# Altium footprint library FootPrintLib_10.PcbLib: 270 footprints (part 6 of 17)
Each footprint in its own frame and in the unit in brackets; x right, y up, seen from the top. Pads: shape width x height; smd on the part's side, far side on the other; paste and mask are expansions set on the pad; w line width, h text height; cw(c..) or ccw(c..) is an arc to the next point about the centre after c.
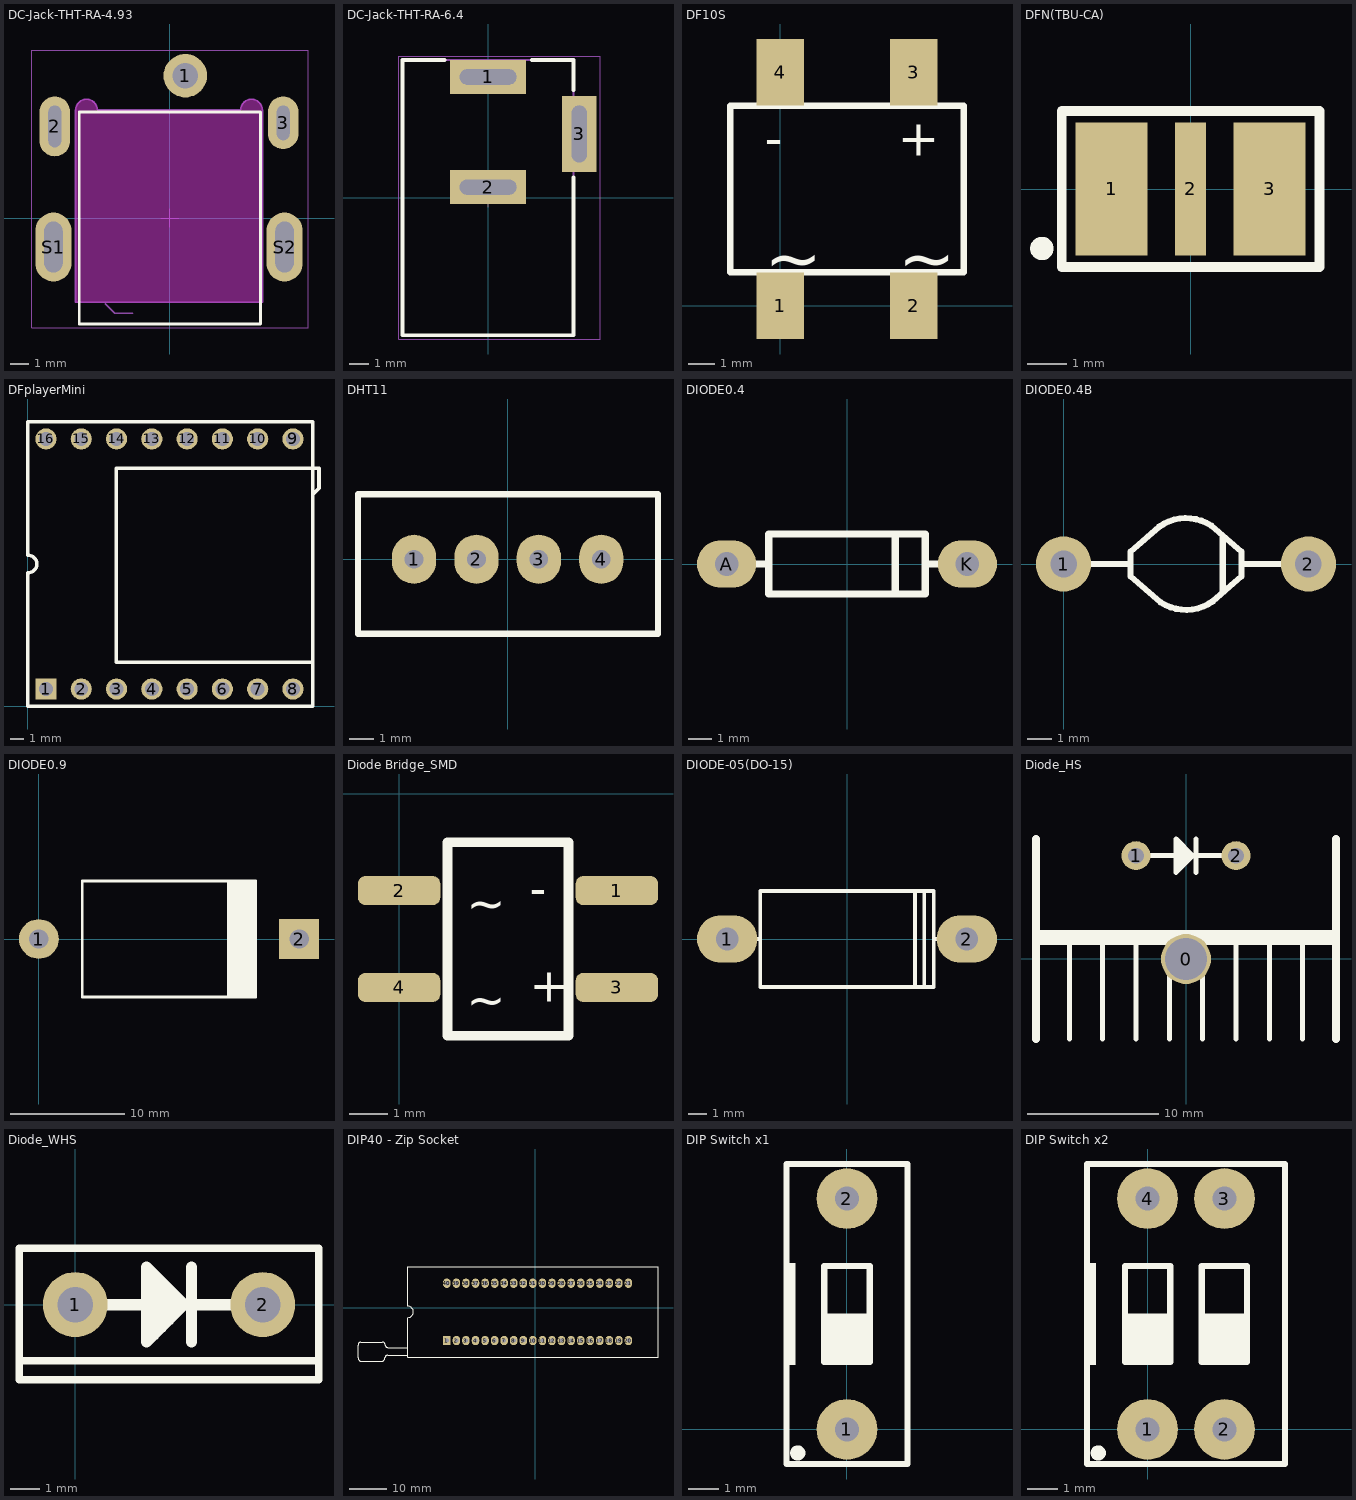
[diagram p5: the footprints below, top view; thin cyan lines are the x and y axes]

## DC-Jack-THT-RA-4.93 [mm] "DC Power Jack Right Angled Shielded THT ?4.93"
height 9.1
pads (5):
  round 2.4 hole 1.4: 1(0.85,7.85)
  oval 1.7x3.3 hole 0.7 slot 2.3 at 90 deg: 2(-6.35,5.05)
  oval 1.7x2.9 hole 0.7 slot 1.9 at 90 deg: 3(6.25,5.25)
  oval 2x3.8 hole 1 slot 2.8 at 90 deg: S1(-6.425,-1.6) S2(6.325,-1.6)
Top Overlay:
  lines w0.15: -5,-5.85 5,-5.85 5,5.85 -5,5.85 -5,-5.85
Keep-Out Layer:
  board cut-out: -5.2,-4.65 5.1,-4.65 5.1,5.95 5.1,6.069 5.009,6.29 4.84,6.459 4.619,6.55 4.381,6.55 4.16,6.459 3.991,6.29 3.9,6.069 3.9,5.95 -4,5.95 -4,6.069 -4.091,6.29 -4.26,6.459 -4.481,6.55 -4.719,6.55 -4.94,6.459 -5.109,6.29 -5.2,6.069 -5.2,5.95
Mechanical 2:
  lines w0.1: -3.55,-4.75 -3.05,-5.25 -2.05,-5.25
  text "PCB Edge" at -1.82,-5.57 h1
  text "Board Cutout Area" at -3.55,-0.25 h1
Mechanical 8:
  lines w0.1: -5.2,-4.65 -5.2,5.95 cw(c-4.6,5.95) -4,5.95 3.9,5.95 cw(c4.5,5.95) 5.1,5.95 5.1,-4.65 -5.2,-4.65
Mechanical 13:
  lines w0.1: -5,-5.85 -5,5.85 5,5.85 5,-5.85 -5,-5.85
Mechanical 15:
  lines w0.05: -0.5,0 0.5,0 ; 0,-0.5 0,0.5 ; -7.625,-6.05 7.625,-6.05 7.625,9.25 -7.625,9.25 -7.625,-6.05
3D body "694105309102.stp": height 5.45, standoff -3.65, extent -6.61,-5.85 6.51,8.35

## DC-Jack-THT-RA-6.4 [mm] "DC Power Jack Right Angled(6.4)"
height 10.7
pads (3):
  rect 4x1.8 hole 0.8 slot 3 at 0 deg: 1(0,6.35) 2(0,0.55)
  rect 1.8x4 hole 0.8 slot 3 at 90 deg: 3(4.8,3.35)
Top Overlay:
  lines w0.2: -2.3,7.25 -4.5,7.25 -4.5,-7.25 4.5,-7.25 4.5,1.05 ; 2.3,7.25 4.5,7.25 4.5,5.65
Mechanical 13:
  lines w0.1: -4.5,-7.25 4.5,-7.25 4.5,7.25 -4.5,7.25 -4.5,-7.25
Mechanical 15:
  lines w0.05: -0.5,0 0.5,0 ; 0,-0.5 0,0.5 ; -4.7,-7.45 5.9,-7.45 5.9,7.45 -4.7,7.45 -4.7,-7.45
3D body "694106301002.stp": height 10.75, standoff -3.75, extent -4.5,-7.25 5,7.25

## DF10S [mm]
pads (4):
  rect 1.8x2.54 smd: 1(0,0) 2(5.08,0) 3(5.08,8.89) 4(0,8.89)
Top Overlay:
  lines w0.254: -1.905,1.27 -1.905,7.62 6.985,7.62 6.985,1.27 -1.905,1.27
  text "+" at 4.481,5.715 h1.4
  text "-" at -0.599,5.715 h1.4
  text "~" at 4.49,0.889 h1.91
  text "~" at -0.59,0.889 h1.91

## DFN(TBU-CA) [mm] "TBU-CA Series - TBU® High-Speed Protectors"
height 1
pads (3):
  rect 1.85x3.4 smd: 1(-2.025,0) 3(2.025,0)
  rect 0.8x3.4 smd: 2(0,0)
Top Overlay:
  circle w0.3: c-3.81,-1.524 r0.15
  lines w0.254: -3.286,-2 -3.3,-2 ; -3.3,-2 3.3,-2 3.3,2 -3.3,2 -3.3,-2
3D body "User Library-Part+Studio+1.STEP": height 1, standoff -0.05, extent -3.25,-2 3.25,2

## DFplayerMini [mm] "Mini MP3 And WMV Player"
height 10
pads (16):
  rect 1.524x1.524 hole 1: 1(1.3,1.25)
  round 1.524 hole 1: 2(3.84,1.25) 3(6.38,1.25) 4(8.92,1.25) 5(11.46,1.25) 6(14,1.25) 7(16.54,1.25) 8(19.08,1.25) 9(19.08,19.25) 10(16.54,19.25) 11(14,19.25) 12(11.46,19.25) 13(8.92,19.25) 14(6.38,19.25) 15(3.84,19.25) 16(1.3,19.25)
Top Overlay:
  lines w0.254: 20.5,3.175 6.35,3.175 6.35,17.145 20.5,17.145 20.955,17.145 20.955,15.695 20.5,15.24 ; 0,0 20.5,0 20.5,20.5 0,20.5 0,10.891 cw(c0,10.25) 0,9.609 0,0

## DHT11 [mm]
pads (4):
  oval 1.8x2 hole 0.762: 1(-3.81,0) 2(-1.27,0) 3(1.27,0) 4(3.81,0)
Top Overlay:
  lines w0.254: -6.09,-3.03 -6.09,2.64 6.12,2.64 6.12,-3.03 -6.09,-3.03
3D body "DHT_11.SLDPRT": height 15.5, standoff -8, extent -5.98,-2.98 6.02,2.52

## DIODE0.4 [mm]
pads (2):
  oval 2.5x2 hole 1: A(-5.08,0) K(5.08,0)
Top Overlay:
  lines w0.305: -4.064,0 -3.302,0 ; 2.032,-1.27 2.032,1.27 ; 3.302,0 4.064,0 ; -3.302,-1.27 -3.302,1.27 3.302,1.27 3.302,-1.27 -3.302,-1.27
3D body "User Library-DO-41-1.step": height 3.24, standoff -2.09, extent -5.512,-1.37 5.512,1.37

## DIODE0.4B [mil]
pads (2):
  round 90 hole 43.31: 1(0,0) 2(400,0)
Top Overlay:
  lines w10: 40,0 109.45,0 ; 260,-45 260,45 ; 290.55,0 360,0 ; 109.45,-20 158.4,-62.4 ccw(c200,0) 243.59,-61.03 290.55,-20 290.55,20 241.6,62.4 ccw(c200,0) 156.41,61.03 109.45,20 109.45,-20

## DIODE0.9 [mm]
pads (2):
  round 3.5 hole 1.7: 1(0,0)
  rect 3.5x3.5 hole 1.7: 2(22.86,0)
Top Overlay:
  rectangle: 16.51,-5.08 19.05,5.08
  lines w0.254: 3.81,-5.08 3.81,5.08 19.05,5.08 19.05,-5.08 3.81,-5.08

## Diode Bridge_SMD [mil]
pads (4):
  rrect50% 85x30 smd: 1(225,-100) 2(0,-100) 3(225,-200) 4(0,-200)
Top Overlay:
  lines w10: 50,-250 50,-50 175,-50 175,-250 50,-250
  text "~" at 70,-230 h35
  text "+" at 135,-215 h35
  text "~" at 70,-130 h35
  text "-" at 135,-115 h35

## DIODE-05(DO-15) [mm]
height 7.5
pads (2):
  oval 3.2x2.5 hole 1.2: 1(-6.35,0) 2(6.35,0)
Top Overlay:
  lines w0.2: -6,0 -4.6,0 ; 3.6,-2.54 3.6,2.54 ; 4.1,-2.54 4.1,2.54 ; 4.6,0 6,0 ; -4.6,-2.54 4.6,-2.54 4.6,2.54 -4.6,2.54 -4.6,-2.54
3D body "User Library-DO-204AR-1.STEP": height 6.22, standoff -2, extent -9.525,-3.112 9.525,3.113

## Diode_HS [mm]
pads (3):
  round 3.81 hole 3.2: 0(0,-0.024)
  round 2.2 hole 1.2: 1(-3.81,7.85) 2(3.81,7.85)
Top Overlay:
  lines w0.381: -11.43,1.246 11.43,1.246 11.43,1.754 -11.43,1.754 -11.43,1.5 11.43,1.5 ; -11.43,2.008 11.43,2.008 ; -8.89,-6.12 -8.89,1.5 ; -6.35,-6.12 -6.35,1.5 ; -3.81,-6.12 -3.81,1.5 ; -3.81,7.85 3.81,7.85 ; -1.27,-6.12 -1.27,1.5 ; -0.508,6.834 -0.508,8.866 ; -0.254,7.088 -0.254,8.612 ; 0,7.342 0,8.358 ; 0.762,6.58 0.762,9.12 ; 1.27,-6.12 1.27,1.5 ; 3.81,-6.12 3.81,1.5 ; 6.35,-6.12 6.35,1.5 ; 8.89,-6.12 8.89,1.5 ; -0.762,6.58 -0.762,9.12 0.508,7.85 -0.762,6.58
  lines w0.635: -11.43,-6.12 -11.43,9.12 ; 11.43,-6.12 11.43,9.12

## Diode_WHS [mm]
pads (2):
  round 2.2 hole 1.2: 1(0,0) 2(6.35,0)
Top Overlay:
  lines w0.254: -1.905,-1.905 8.255,-1.905 ; -1.905,-2.54 8.255,-2.54 8.255,1.905 -1.905,1.905 -1.905,-2.54
  lines w0.381: 0,0 6.35,0 ; 2.667,-1.016 2.667,1.016 ; 2.921,-0.762 2.921,0.762 ; 3.175,-0.508 3.175,0.508 ; 3.937,-1.27 3.937,1.27 ; 2.413,-1.27 3.683,0 2.413,1.27 2.413,-1.27

## DIP40 - Zip Socket [mm] "40 Pin Zip Socket"
height 12
pads (40):
  rect 2x2.5 hole 1.1: 1(-23.495,-8.763)
  oval 2x2.5 hole 1.1: 2(-20.955,-8.763) 3(-18.415,-8.763) 4(-15.875,-8.763) 5(-13.335,-8.763) 6(-10.795,-8.763) 7(-8.255,-8.763) 8(-5.715,-8.763) 9(-3.175,-8.763) 10(-0.635,-8.763) 11(1.905,-8.763) 12(4.445,-8.763) 13(6.985,-8.763) 14(9.525,-8.763) 15(12.065,-8.763) 16(14.605,-8.763) 17(17.145,-8.763) 18(19.685,-8.763) 19(22.225,-8.763) 20(24.765,-8.763) 21(24.765,6.477) 22(22.225,6.477) 23(19.685,6.477) 24(17.145,6.477) 25(14.605,6.477) 26(12.065,6.477) 27(9.525,6.477) 28(6.985,6.477) 29(4.445,6.477) 30(1.905,6.477) 31(-0.635,6.477) 32(-3.175,6.477) 33(-5.715,6.477) 34(-8.255,6.477) 35(-10.795,6.477) 36(-13.335,6.477) 37(-15.875,6.477) 38(-18.415,6.477) 39(-20.955,6.477) 40(-23.495,6.477)
Top Overlay:
  lines w0.2: -33.865,-12.7 -39.268,-12.7 ccw(c-39.268,-13.386) -39.954,-13.386 cw(c-40.843,-13.386) -40.843,-14.275 -46.177,-14.275 cw(c-46.177,-13.341) -47.111,-13.341 -47.111,-9.951 cw(c-46.33,-9.951) -46.33,-9.169 -40.634,-9.169 cw(c-40.634,-9.951) -39.853,-9.951 ccw(c-39.16,-9.951) -39.16,-10.643 -33.865,-10.643 ; -33.865,-13.143 -33.865,-2.643 ccw(c-33.865,-1.143) -33.865,0.357 -33.865,10.857 32.635,10.857 32.635,-13.143 -33.865,-13.143
3D body "Zif-Zip Socket.STEP": height 21.95, standoff -2.53, extent -40.944,-14.118 32.11,10.358

## DIP Switch x1 [mm] "Switch DIP 1 way flat slide Thru-Hole"
height 7
pads (2):
  round 2 hole 0.8: 1(0,0) 2(0,7.62)
Top Overlay:
  circle w0.25: c-1.625,-0.775 r0.125
  rectangle: -0.75,2.225 0.75,3.825
  rectangle: -2,2.125 -1.7,5.5
  lines w0.2: -2,-1.14 2,-1.14 2,8.76 -2,8.76 -2,-1.14 ; -0.75,2.225 -0.75,5.395 0.75,5.395 0.75,2.225 -0.75,2.225
3D body "User Library-DS1040-01 (DIP_switch).STEP": height 6.8, standoff -3.85, extent -2,-1.14 2,8.76

## DIP Switch x2 [mm] "Switch DIP 2 way flat slide Thru-Hole"
height 7
pads (4):
  round 2 hole 0.8: 1(0,0) 2(2.54,0) 3(2.54,7.62) 4(0,7.62)
Top Overlay:
  circle w0.25: c-1.625,-0.775 r0.125
  rectangle: -0.75,2.225 0.75,3.825
  rectangle: 1.79,2.225 3.29,3.825
  rectangle: -2,2.125 -1.7,5.5
  lines w0.2: -2,-1.14 4.54,-1.14 4.54,8.76 -2,8.76 -2,-1.14 ; -0.75,2.225 -0.75,5.395 0.75,5.395 0.75,2.225 -0.75,2.225 ; 1.79,2.225 3.29,2.225 3.29,5.395 1.79,5.395 1.79,2.225
3D body "User Library-DS1040-02 (DIP_switch).STEP": height 6.8, standoff -3.85, extent -2,-1.14 4.54,8.76